# Altium footprint library SAMTEC-A-TSM-103-01-L-SH.PcbLib: 1 footprints
Each footprint in its own frame and in the unit in brackets; x right, y up, seen from the top. Pads: shape width x height; smd on the part's side, far side on the other; paste and mask are expansions set on the pad; w line width, h text height; cw(c..) or ccw(c..) is an arc to the next point about the centre after c.
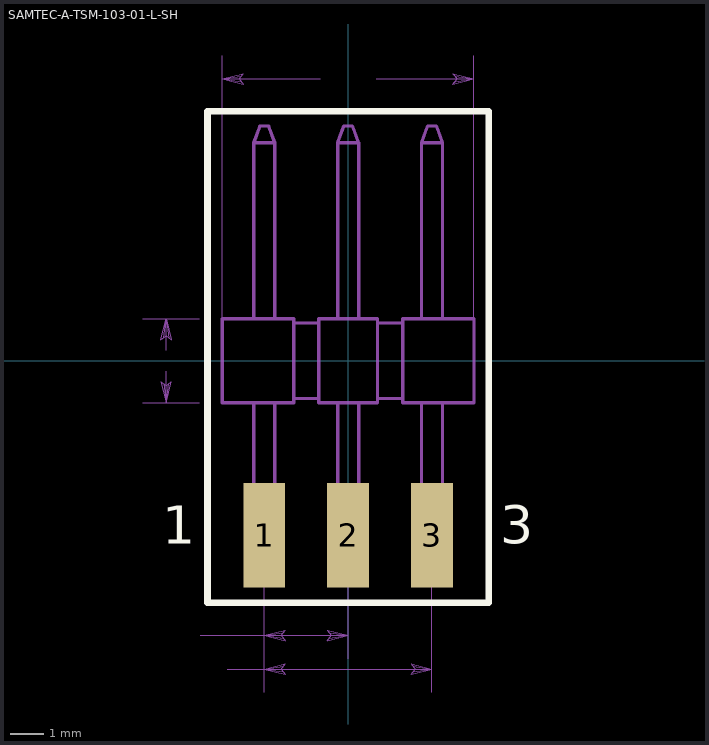
[diagram p0: the footprint, top view; thin cyan lines are the x and y axes]

## SAMTEC-A-TSM-103-01-L-SH [mil]
pads (3):
  rect 50x125.2 smd: 1(-100,-207.99) 2(0,-207.99) 3(100,-207.99)
Top Overlay:
  lines w7.87: -167.72,-288.35 167.72,-288.35 167.72,297.72 -167.72,297.72 -167.72,-288.35
  text "3" at 181.14,-232.99 h77.5
  text "1" at -221.65,-232.99 h77.5
Top Paste:
  rectangle: 75,-270.59 125,-145.39
  rectangle: -25,-270.59 25,-145.39
  rectangle: -125,-270.59 -75,-145.39
Top Solder:
  rectangle: 72.99,-272.6 127.01,-143.39
  rectangle: -27.01,-272.6 27.01,-143.39
  rectangle: -127.01,-272.6 -72.99,-143.39
Mechanical 16:
  lines w3.94: -112.52,-167.64 -87.48,-167.64 ; -112.52,50 -112.52,260 ; -87.48,50 -87.48,260 ; -12.52,-167.91 12.52,-167.91 ; -12.52,-50 -12.52,-210 ; 87.48,-167.72 112.52,-167.72 ; 87.48,-50 87.48,-210 ; 87.48,50 87.48,260 ; 112.52,-50 112.52,-210 ; 112.52,50 112.52,260 ; -112.52,-210 -112.52,-50 ; -112.52,-210 -105.24,-230 -94.76,-230 -87.48,-210 ; -112.52,-210 -87.48,-210 ; -112.52,-50 -87.48,-50 ; -112.52,-50 -150,-50 -150,50 -65,50 -65,45 ; -112.52,260 -87.48,260 ; -112.52,260 -105.24,280 -94.76,280 -87.48,260 ; -87.48,-210 -87.48,-50 ; -87.48,-50 -65,-50 -65,-45 ; -65,-45 -65,45 ; -65,-45 -50,-45 -35,-45 ; -65,45 -50,45 -35,45 ; -35,-45 -35,45 ; -35,-45 -35,-50 12.52,-50 ; -35,45 -35,50 -12.52,50 ; -12.52,-210 -5.24,-230 5.24,-230 12.52,-210 ; -12.52,-210 12.52,-210 ; -12.52,50 12.52,50 ; -12.52,50 -12.52,260 ; -12.52,260 12.52,260 ; -12.52,260 -5.24,280 5.24,280 12.52,260 ; 12.52,-210 12.52,-50 ; 12.52,-50 35,-50 35,-45 ; 12.52,50 12.52,260 ; 12.52,50 35,50 35,45 ; 35,-45 35,45 ; 35,-45 50,-45 65,-45 ; 35,45 50,45 65,45 ; 65,-45 65,-50 150,-50 150,50 65,50 65,45 ; 65,-45 65,45 ; 87.48,-210 112.52,-210 ; 87.48,-210 94.76,-230 105.24,-230 112.52,-210 ; 87.48,260 112.52,260 ; 87.48,260 94.76,280 105.24,280 112.52,260
  text "3" at 181.14,-232.99 h77.5
  text "1" at -221.65,-232.99 h77.5
Mechanical 40:
  lines w0: -244.61,-50 -177.6,-50 ; -244.61,50 -177.6,50 ; -217.01,-12.52 -217.01,-50 ; -217.01,12.52 -217.01,50 ; -176.5,-327.48 -100,-327.48 ; -150,-22.4 -150,363.7 ; -144.02,-367.48 -100,-367.48 ; -100,-395.12 -100,-235.59 -100,-355.12 ; -33.5,336.1 -150,336.1 ; 0,-355.12 0,-235.59 ; 33.5,336.1 150,336.1 ; 100,-395.12 100,-235.59 ; 150,-22.4 150,363.7 ; -223.27,-25 -220.12,-27.48 -217.01,-50 ; -223.27,-25 -217.01,-30 ; -223.27,-25 -217.01,-50 ; -217.01,-50 -217.01,-30 ; -217.01,-50 -213.86,-27.48 -217.01,-30 ; -217.01,-50 -210.75,-25 -217.01,-30 ; -217.01,30 -217.01,50 ; -217.01,30 -220.12,27.48 -217.01,50 ; -217.01,30 -210.75,25 ; -217.01,30 -223.27,25 -217.01,50 ; -217.01,50 -213.86,27.48 -210.75,25 ; -217.01,50 -210.75,25 ; -150,336.1 -127.48,339.21 -125,342.36 ; -150,336.1 -130,336.1 ; -150,336.1 -127.48,332.99 -130,336.1 ; -150,336.1 -125,329.84 -130,336.1 ; -150,336.1 -125,342.36 ; -130,336.1 -125,342.36 ; -100,-367.48 100,-367.48 ; -100,-367.48 -77.48,-364.37 -75,-361.26 ; -100,-367.48 -80,-367.48 ; -100,-367.48 -77.48,-370.63 -80,-367.48 ; -100,-367.48 -75,-373.74 -80,-367.48 ; -100,-367.48 -75,-361.26 ; -100,-327.48 0,-327.48 ; -100,-327.48 -77.48,-324.37 -75,-321.26 ; -100,-327.48 -80,-327.48 ; -100,-327.48 -77.48,-330.63 -80,-327.48 ; -100,-327.48 -75,-333.74 -80,-327.48 ; -100,-327.48 -75,-321.26 ; -80,-367.48 -75,-361.26 ; -80,-327.48 -75,-321.26 ; -25,-333.74 -22.52,-330.63 0,-327.48 ; -25,-333.74 -20,-327.48 ; -25,-333.74 0,-327.48 ; -20,-327.48 0,-327.48 ; -20,-327.48 -22.52,-324.37 0,-327.48 ; -20,-327.48 -25,-321.26 0,-327.48 ; 75,-373.74 77.48,-370.63 100,-367.48 ; 75,-373.74 80,-367.48 ; 75,-373.74 100,-367.48 ; 80,-367.48 100,-367.48 ; 80,-367.48 77.48,-364.37 100,-367.48 ; 80,-367.48 75,-361.26 100,-367.48 ; 125,329.84 127.48,332.99 150,336.1 ; 125,329.84 130,336.1 ; 125,329.84 150,336.1 ; 130,336.1 150,336.1 ; 130,336.1 127.48,339.21 150,336.1 ; 130,336.1 125,342.36 150,336.1
  text "7.620" at -25.98,331.1 h15.5
  text "2.540" at -242.99,-5 h15.5
  text "5.080" at -203.5,-372.52 h15.5
  text "2.540" at -235.98,-332.52 h15.5
Mechanical 42:
  lines w3.94: -167.72,-288.35 167.72,-288.35 167.72,297.72 -167.72,297.72 -167.72,-288.35